# Altium schematic symbol library CAP,Trim,2-6pF,100V,SMD.Schlib: 1 symbol
Pins are listed as number, name and electrical type; pins without a type are passive.

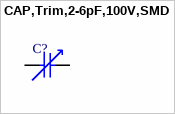
[diagram p0: symbol CAP,Trim,2-6pF,100V,SMD]

## CAP,Trim,2-6pF,100V,SMD
designator C?
pins: 1, 2